# Altium schematic symbol library Bluetechnix_Symbol_CM-BF548.SchLib: 1 symbol
Pins are listed as number, name and electrical type; pins without a type are passive.

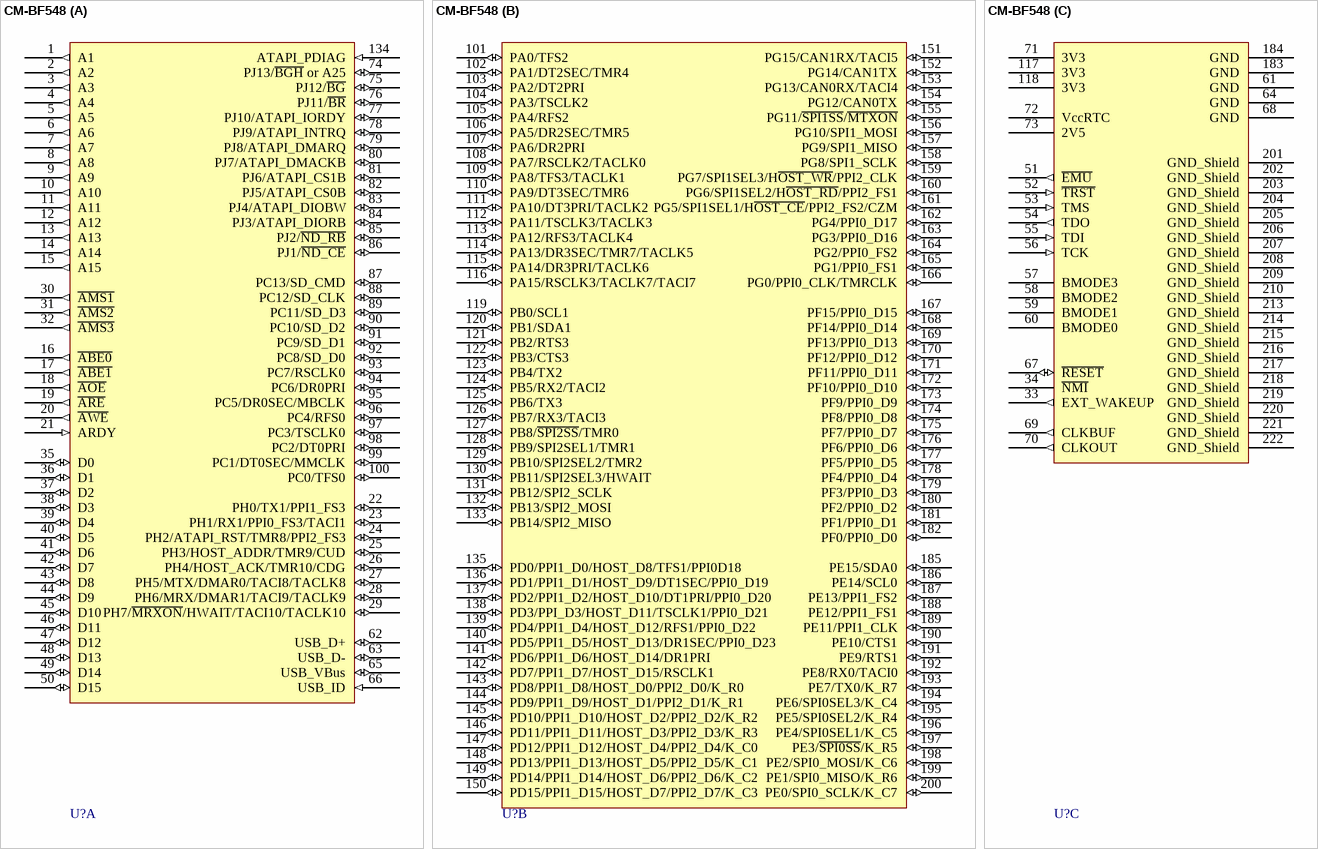
[diagram p0: symbol CM-BF548]

## CM-BF548
designator U?  (value not drawn)
part A pins: 1 A1 (out), 2 A2 (out), 3 A3 (out), 4 A4 (out), 5 A5 (out), 6 A6 (out), 7 A7 (out), 8 A8 (out), 9 A9 (out), 10 A10 (out), 11 A11 (out), 12 A12 (out), 13 A13 (out), 14 A14 (out), 15 A15 (out), 16 ~{ABE0} (out), 17 ~{ABE1} (out), 18 ~{AOE} (out), 19 ~{ARE} (out), 20 ~{AWE} (out), 21 ARDY (in), 22 PH0/TX1/PPI1_FS3 (io), 23 PH1/RX1/PPI0_FS3/TACI1 (io), 24 PH2/ATAPI_RST/TMR8/PPI2_FS3 (io), 25 PH3/HOST_ADDR/TMR9/CUD (io), 26 PH4/HOST_ACK/TMR10/CDG (io), 27 PH5/MTX/DMAR0/TACI8/TACLK8 (io), 28 PH6/MRX/DMAR1/TACI9/TACLK9 (io), 29 PH7/~{MRXON}/HWAIT/TACI10/TACLK10 (io), 30 ~{AMS1} (out), 31 ~{AMS2} (out), 32 ~{AMS3} (out), 35 D0 (io), 36 D1 (io), 37 D2 (io), 38 D3 (io), 39 D4 (io), 40 D5 (io), 41 D6 (io), 42 D7 (io), 43 D8 (io), 44 D9 (io), 45 D10 (io), 46 D11 (io), 47 D12 (io), 48 D13 (io), 49 D14 (io), 50 D15 (io), 62 USB_D+ (io), 63 USB_D- (io), 65 USB_VBus (io), 66 USB_ID (in), 74 PJ13/~{BGH} or A25 (io), 75 PJ12/~{BG} (io), 76 PJ11/~{BR} (io), 77 PJ10/ATAPI_IORDY (io), 78 PJ9/ATAPI_INTRQ (io), 79 PJ8/ATAPI_DMARQ (io), 80 PJ7/ATAPI_DMACKB (io), 81 PJ6/ATAPI_CS1B (io), 82 PJ5/ATAPI_CS0B (io), 83 PJ4/ATAPI_DIOBW (io), 84 PJ3/ATAPI_DIORB (io), 85 PJ2/~{ND_RB} (io), 86 PJ1/~{ND_CE} (io), 87 PC13/SD_CMD (io), 88 PC12/SD_CLK (io), 89 PC11/SD_D3 (io), 90 PC10/SD_D2 (io), 91 PC9/SD_D1 (io), 92 PC8/SD_D0 (io), 93 PC7/RSCLK0 (io), 94 PC6/DR0PRI (io), 95 PC5/DR0SEC/MBCLK (io), 96 PC4/RFS0 (io), 97 PC3/TSCLK0 (io), 98 PC2/DT0PRI (io), 99 PC1/DT0SEC/MMCLK (io), 100 PC0/TFS0 (io), 134 ATAPI_PDIAG (in)
part B pins: 101 PA0/TFS2 (io), 102 PA1/DT2SEC/TMR4 (io), 103 PA2/DT2PRI (io), 104 PA3/TSCLK2 (io), 105 PA4/RFS2 (io), 106 PA5/DR2SEC/TMR5 (io), 107 PA6/DR2PRI (io), 108 PA7/RSCLK2/TACLK0 (io), 109 PA8/TFS3/TACLK1 (io), 110 PA9/DT3SEC/TMR6 (io), 111 PA10/DT3PRI/TACLK2 (io), 112 PA11/TSCLK3/TACLK3 (io), 113 PA12/RFS3/TACLK4 (io), 114 PA13/DR3SEC/TMR7/TACLK5 (io), 115 PA14/DR3PRI/TACLK6 (io), 116 PA15/RSCLK3/TACLK7/TACI7 (io), 119 PB0/SCL1 (io), 120 PB1/SDA1 (io), 121 PB2/RTS3 (io), 122 PB3/CTS3 (io), 123 PB4/TX2 (io), 124 PB5/RX2/TACI2 (io), 125 PB6/TX3 (io), 126 PB7/RX3/TACI3 (io), 127 PB8/~{SPI2SS}/TMR0 (io), 128 PB9/SPI2SEL1/TMR1 (io), 129 PB10/SPI2SEL2/TMR2 (io), 130 PB11/SPI2SEL3/HWAIT (io), 131 PB12/SPI2_SCLK (io), 132 PB13/SPI2_MOSI (io), 133 PB14/SPI2_MISO (io), 135 PD0/PPI1_D0/HOST_D8/TFS1/PPI0D18 (io), 136 PD1/PPI1_D1/HOST_D9/DT1SEC/PPI0_D19 (io), 137 PD2/PPI1_D2/HOST_D10/DT1PRI/PPI0_D20 (io), 138 PD3/PPI_D3/HOST_D11/TSCLK1/PPI0_D21 (io), 139 PD4/PPI1_D4/HOST_D12/RFS1/PPI0_D22 (io), 140 PD5/PPI1_D5/HOST_D13/DR1SEC/PPI0_D23 (io), 141 PD6/PPI1_D6/HOST_D14/DR1PRI (io), 142 PD7/PPI1_D7/HOST_D15/RSCLK1 (io), 143 PD8/PPI1_D8/HOST_D0/PPI2_D0/K_R0 (io), 144 PD9/PPI1_D9/HOST_D1/PPI2_D1/K_R1 (io), 145 PD10/PPI1_D10/HOST_D2/PPI2_D2/K_R2 (io), 146 PD11/PPI1_D11/HOST_D3/PPI2_D3/K_R3 (io), 147 PD12/PPI1_D12/HOST_D4/PPI2_D4/K_C0 (io), 148 PD13/PPI1_D13/HOST_D5/PPI2_D5/K_C1 (io), 149 PD14/PPI1_D14/HOST_D6/PPI2_D6/K_C2 (io), 150 PD15/PPI1_D15/HOST_D7/PPI2_D7/K_C3 (io), 151 PG15/CAN1RX/TACI5 (io), 152 PG14/CAN1TX (io), 153 PG13/CAN0RX/TACI4 (io), 154 PG12/CAN0TX (io), 155 PG11/~{SPI1SS}/~{MTXON} (io), 156 PG10/SPI1_MOSI (io), 157 PG9/SPI1_MISO (io), 158 PG8/SPI1_SCLK (io), 159 PG7/SPI1SEL3/H~{OST_WR}/PPI2_CLK (io), 160 PG6/SPI1SEL2/H~{OST_RD}/PPI2_FS1 (io), 161 PG5/SPI1SEL1/H~{OST_CE}/PPI2_FS2/CZM (io), 162 PG4/PPI0_D17 (io), 163 PG3/PPI0_D16 (io), 164 PG2/PPI0_FS2 (io), 165 PG1/PPI0_FS1 (io), 166 PG0/PPI0_CLK/TMRCLK (io), 167 PF15/PPI0_D15 (io), 168 PF14/PPI0_D14 (io), 169 PF13/PPI0_D13 (io), 170 PF12/PPI0_D12 (io), 171 PF11/PPI0_D11 (io), 172 PF10/PPI0_D10 (io), 173 PF9/PPI0_D9 (io), 174 PF8/PPI0_D8 (io), 175 PF7/PPI0_D7 (io), 176 PF6/PPI0_D6 (io), 177 PF5/PPI0_D5 (io), 178 PF4/PPI0_D4 (io), 179 PF3/PPI0_D3 (io), 180 PF2/PPI0_D2 (io), 181 PF1/PPI0_D1 (io), 182 PF0/PPI0_D0 (io), 185 PE15/SDA0 (io), 186 PE14/SCL0 (io), 187 PE13/PPI1_FS2 (io), 188 PE12/PPI1_FS1 (io), 189 PE11/PPI1_CLK (io), 190 PE10/CTS1 (io), 191 PE9/RTS1 (io), 192 PE8/RX0/TACI0 (io), 193 PE7/TX0/K_R7 (io), 194 PE6/SPI0SEL3/K_C4 (io), 195 PE5/SPI0SEL2/K_R4 (io), 196 PE4/SPI0SEL1/K_C5 (io), 197 PE3/~{SPI0SS}/K_R5 (io), 198 PE2/SPI0_MOSI/K_C6 (io), 199 PE1/SPI0_MISO/K_R6 (io), 200 PE0/SPI0_SCLK/K_C7 (io)
part C pins: 33 EXT_WAKEUP (out), 34 ~{NMI}, 51 ~{EMU} (out), 52 ~{TRST} (in), 53 TMS (in), 54 TDO (out), 55 TDI (in), 56 TCK (in), 57 BMODE3, 58 BMODE2, 59 BMODE1, 60 BMODE0, 61 GND (power), 64 GND (power), 67 ~{RESET} (io), 68 GND (power), 69 CLKBUF (out), 70 CLKOUT (out), 71 3V3 (power), 72 VccRTC (power), 73 2V5 (power), 117 3V3 (power), 118 3V3 (power), 183 GND (power), 184 GND (power), 201 GND_Shield, 202 GND_Shield, 203 GND_Shield, 204 GND_Shield, 205 GND_Shield, 206 GND_Shield, 207 GND_Shield, 208 GND_Shield, 209 GND_Shield, 210 GND_Shield, 213 GND_Shield, 214 GND_Shield, 215 GND_Shield, 216 GND_Shield, 217 GND_Shield, 218 GND_Shield, 219 GND_Shield, 220 GND_Shield, 221 GND_Shield, 222 GND_Shield